# Altium footprint library ADRF6520.PcbLib: 4 footprints
Each footprint in its own frame and in the unit in brackets; x right, y up, seen from the top. Pads: shape width x height; smd on the part's side, far side on the other; paste and mask are expansions set on the pad; w line width, h text height; cw(c..) or ccw(c..) is an arc to the next point about the centre after c.
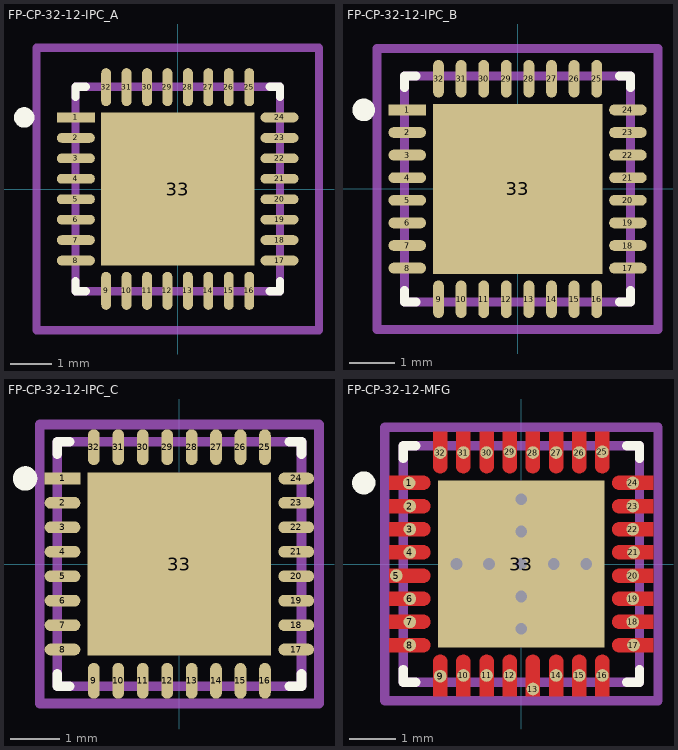
[diagram p0: the footprints below, top view; thin cyan lines are the x and y axes]

## FP-CP-32-12-IPC_A [mm]
pads (33):
  rect 0.931x0.239 smd paste+0 mask+0: 1(-2.491,1.75)
  rrect100% 0.931x0.239 smd paste+0 mask+0: 2(-2.491,1.25) 3(-2.491,0.75) 4(-2.491,0.25) 5(-2.491,-0.25) 6(-2.491,-0.75) 7(-2.491,-1.25) 8(-2.491,-1.75) 17(2.491,-1.75) 18(2.491,-1.25) 19(2.491,-0.75) 20(2.491,-0.25) 21(2.491,0.25) 22(2.491,0.75) 23(2.491,1.25) 24(2.491,1.75)
  rrect100% 0.239x0.931 smd paste+0 mask+0: 9(-1.75,-2.491) 10(-1.25,-2.491) 11(-0.75,-2.491) 12(-0.25,-2.491) 13(0.25,-2.491) 14(0.75,-2.491) 15(1.25,-2.491) 16(1.75,-2.491) 25(1.75,2.491) 26(1.25,2.491) 27(0.75,2.491) 28(0.25,2.491) 29(-0.25,2.491) 30(-0.75,2.491) 31(-1.25,2.491) 32(-1.75,2.491)
  rect 3.75x3.75 smd paste-1000 mask+0: 33(0,0)
Top Overlay:
  circle w0.25: c-3.756,1.75 r0.125
  lines w0.2: -2.5,-2.25 -2.5,-2.5 -2.25,-2.5 ; -2.5,2.25 -2.5,2.5 -2.25,2.5 ; 2.25,-2.5 2.5,-2.5 2.5,-2.25 ; 2.25,2.5 2.5,2.5 2.5,2.25
Top Paste:
  rectangle: -1.186,-1.186 1.186,1.186
Top Assembly:
  lines w0.2: -3.456,-3.456 3.456,-3.456 3.456,3.456 -3.456,3.456 -3.456,-3.456
  text ".Designator" at 0,0.188 h1
Top 3D Body:
  lines w0.2: -2.5,-2.5 2.5,-2.5 2.5,2.5 -2.5,2.5 -2.5,-2.5
Top Courtyard:
  lines w0.2: -3.456,-3.456 3.456,-3.456 3.456,3.456 -3.456,3.456 -3.456,-3.456
Top Component Center:
  lines w0.1: -0.5,0 0.5,0 ; 0,-0.5 0,0.5
3D body "IC_Analog_Devices_AD5423BCPZ-RL7_eec.STEP": height 0.25, standoff 0, extent -3.456,-3.456 3.456,3.456

## FP-CP-32-12-IPC_B [mm]
pads (33):
  rect 0.831x0.239 smd paste+0 mask+0: 1(-2.441,1.75)
  rrect100% 0.831x0.239 smd paste+0 mask+0: 2(-2.441,1.25) 3(-2.441,0.75) 4(-2.441,0.25) 5(-2.441,-0.25) 6(-2.441,-0.75) 7(-2.441,-1.25) 8(-2.441,-1.75) 17(2.441,-1.75) 18(2.441,-1.25) 19(2.441,-0.75) 20(2.441,-0.25) 21(2.441,0.25) 22(2.441,0.75) 23(2.441,1.25) 24(2.441,1.75)
  rrect100% 0.239x0.831 smd paste+0 mask+0: 9(-1.75,-2.441) 10(-1.25,-2.441) 11(-0.75,-2.441) 12(-0.25,-2.441) 13(0.25,-2.441) 14(0.75,-2.441) 15(1.25,-2.441) 16(1.75,-2.441) 25(1.75,2.441) 26(1.25,2.441) 27(0.75,2.441) 28(0.25,2.441) 29(-0.25,2.441) 30(-0.75,2.441) 31(-1.25,2.441) 32(-1.75,2.441)
  rect 3.75x3.75 smd paste-1000 mask+0: 33(0,0)
Top Overlay:
  circle w0.25: c-3.406,1.75 r0.125
  lines w0.2: -2.5,-2.25 -2.5,-2.5 -2.25,-2.5 ; -2.5,2.25 -2.5,2.5 -2.25,2.5 ; 2.25,-2.5 2.5,-2.5 2.5,-2.25 ; 2.25,2.5 2.5,2.5 2.5,2.25
Top Paste:
  rectangle: -1.186,-1.186 1.186,1.186
Top Assembly:
  lines w0.2: -3.106,-3.106 3.106,-3.106 3.106,3.106 -3.106,3.106 -3.106,-3.106
  text ".Designator" at 0,0.188 h1
Top 3D Body:
  lines w0.2: -2.5,-2.5 2.5,-2.5 2.5,2.5 -2.5,2.5 -2.5,-2.5
Top Courtyard:
  lines w0.2: -3.106,-3.106 3.106,-3.106 3.106,3.106 -3.106,3.106 -3.106,-3.106
Top Component Center:
  lines w0.1: -0.5,0 0.5,0 ; 0,-0.5 0,0.5
3D body "IC_Analog_Devices_AD5423BCPZ-RL7_eec.STEP": height 0.25, standoff 0, extent -3.106,-3.106 3.106,3.106

## FP-CP-32-12-IPC_C [mm]
pads (33):
  rect 0.731x0.239 smd paste+0 mask+0: 1(-2.391,1.75)
  rrect100% 0.731x0.239 smd paste+0 mask+0: 2(-2.391,1.25) 3(-2.391,0.75) 4(-2.391,0.25) 5(-2.391,-0.25) 6(-2.391,-0.75) 7(-2.391,-1.25) 8(-2.391,-1.75) 17(2.391,-1.75) 18(2.391,-1.25) 19(2.391,-0.75) 20(2.391,-0.25) 21(2.391,0.25) 22(2.391,0.75) 23(2.391,1.25) 24(2.391,1.75)
  rrect100% 0.239x0.731 smd paste+0 mask+0: 9(-1.75,-2.391) 10(-1.25,-2.391) 11(-0.75,-2.391) 12(-0.25,-2.391) 13(0.25,-2.391) 14(0.75,-2.391) 15(1.25,-2.391) 16(1.75,-2.391) 25(1.75,2.391) 26(1.25,2.391) 27(0.75,2.391) 28(0.25,2.391) 29(-0.25,2.391) 30(-0.75,2.391) 31(-1.25,2.391) 32(-1.75,2.391)
  rect 3.75x3.75 smd paste-1000 mask+0: 33(0,0)
Top Overlay:
  circle w0.25: c-3.156,1.75 r0.125
  lines w0.2: -2.5,-2.25 -2.5,-2.5 -2.25,-2.5 ; -2.5,2.25 -2.5,2.5 -2.25,2.5 ; 2.25,-2.5 2.5,-2.5 2.5,-2.25 ; 2.25,2.5 2.5,2.5 2.5,2.25
Top Paste:
  rectangle: -1.186,-1.186 1.186,1.186
Top Assembly:
  lines w0.2: -2.856,-2.856 2.856,-2.856 2.856,2.856 -2.856,2.856 -2.856,-2.856
  text ".Designator" at 0,0.188 h1
Top 3D Body:
  lines w0.2: -2.5,-2.5 2.5,-2.5 2.5,2.5 -2.5,2.5 -2.5,-2.5
Top Courtyard:
  lines w0.2: -2.856,-2.856 2.856,-2.856 2.856,2.856 -2.856,2.856 -2.856,-2.856
Top Component Center:
  lines w0.1: -0.5,0 0.5,0 ; 0,-0.5 0,0.5
3D body "IC_Analog_Devices_AD5423BCPZ-RL7_eec.STEP": height 0.25, standoff 0, extent -2.856,-2.856 2.856,2.856

## FP-CP-32-12-MFG [mm]
pads (33):
  round 0.274 smd paste+0 mask+0: 1(-2.421,1.75) 2(-2.405,1.25) 3(-2.405,0.75) 4(-2.405,0.25) 5(-2.698,-0.25) 6(-2.405,-0.75) 7(-2.405,-1.25) 8(-2.405,-1.75) 9(-1.75,-2.421) 10(-1.25,-2.405) 11(-0.75,-2.405) 12(-0.25,-2.405) 13(0.25,-2.698) 14(0.75,-2.405) 15(1.25,-2.405) 16(1.75,-2.405) 17(2.421,-1.75) 18(2.405,-1.25) 19(2.405,-0.75) 20(2.405,-0.25) 21(2.421,0.25) 22(2.405,0.75) 23(2.405,1.25) 24(2.405,1.75) 25(1.75,2.421) 26(1.25,2.405) 27(0.75,2.405) 28(0.25,2.405) 29(-0.25,2.421) 30(-0.75,2.405) 31(-1.25,2.405) 32(-1.75,2.405)
  rect 3.6x3.6 smd paste-1000 mask+0: 33(0,0)
via 0,1.4 diameter 0.533 hole 0.254
via 0,0.7 diameter 0.533 hole 0.254
via 0,-0.7 diameter 0.533 hole 0.254
via 0,-1.4 diameter 0.533 hole 0.254
via -1.4,0 diameter 0.533 hole 0.254
via -0.7,0 diameter 0.533 hole 0.254
via 0,0 diameter 0.533 hole 0.254
via 0.7,0 diameter 0.533 hole 0.254
via 1.4,0 diameter 0.533 hole 0.254
Top Layer:
  region: -2.85,1.902 -2.113,1.902 -2.083,1.902 -2.027,1.879 -1.984,1.836 -1.961,1.78 -1.961,1.75 -1.961,1.72 -1.984,1.664 -2.027,1.621 -2.083,1.598 -2.113,1.598 -2.85,1.598
  region: -2.85,1.402 -2.113,1.402 -2.083,1.402 -2.027,1.379 -1.984,1.336 -1.961,1.28 -1.961,1.25 -1.961,1.22 -1.984,1.164 -2.027,1.121 -2.083,1.098 -2.113,1.098 -2.85,1.098
  region: -2.85,0.902 -2.113,0.902 -2.083,0.902 -2.027,0.879 -1.984,0.836 -1.961,0.78 -1.961,0.75 -1.961,0.72 -1.984,0.664 -2.027,0.621 -2.083,0.598 -2.113,0.598 -2.85,0.598
  region: -2.85,0.402 -2.113,0.402 -2.083,0.402 -2.027,0.379 -1.984,0.336 -1.961,0.28 -1.961,0.25 -1.961,0.22 -1.984,0.164 -2.027,0.121 -2.083,0.098 -2.113,0.098 -2.85,0.098
  region: -2.85,-0.098 -2.113,-0.098 -2.083,-0.098 -2.027,-0.121 -1.984,-0.164 -1.961,-0.22 -1.961,-0.25 -1.961,-0.28 -1.984,-0.336 -2.027,-0.379 -2.083,-0.402 -2.113,-0.402 -2.85,-0.402
  region: -2.85,-0.598 -2.113,-0.598 -2.083,-0.598 -2.027,-0.621 -1.984,-0.664 -1.961,-0.72 -1.961,-0.75 -1.961,-0.78 -1.984,-0.836 -2.027,-0.879 -2.083,-0.902 -2.113,-0.902 -2.85,-0.902
  region: -2.85,-1.098 -2.113,-1.098 -2.083,-1.098 -2.027,-1.121 -1.984,-1.164 -1.961,-1.22 -1.961,-1.25 -1.961,-1.28 -1.984,-1.336 -2.027,-1.379 -2.083,-1.402 -2.113,-1.402 -2.85,-1.402
  region: -2.85,-1.598 -2.113,-1.598 -2.083,-1.598 -2.027,-1.621 -1.984,-1.664 -1.961,-1.72 -1.961,-1.75 -1.961,-1.78 -1.984,-1.836 -2.027,-1.879 -2.083,-1.902 -2.113,-1.902 -2.85,-1.902
  region: 2.85,-1.902 2.113,-1.902 2.083,-1.902 2.027,-1.879 1.984,-1.836 1.961,-1.78 1.961,-1.75 1.961,-1.72 1.984,-1.664 2.027,-1.621 2.083,-1.598 2.113,-1.598 2.85,-1.598
  region: 2.85,-1.402 2.113,-1.402 2.083,-1.402 2.027,-1.379 1.984,-1.336 1.961,-1.28 1.961,-1.25 1.961,-1.22 1.984,-1.164 2.027,-1.121 2.083,-1.098 2.113,-1.098 2.85,-1.098
  region: 2.85,-0.902 2.113,-0.902 2.083,-0.902 2.027,-0.879 1.984,-0.836 1.961,-0.78 1.961,-0.75 1.961,-0.72 1.984,-0.664 2.027,-0.621 2.083,-0.598 2.113,-0.598 2.85,-0.598
  region: 2.85,-0.402 2.113,-0.402 2.083,-0.402 2.027,-0.379 1.984,-0.336 1.961,-0.28 1.961,-0.25 1.961,-0.22 1.984,-0.164 2.027,-0.121 2.083,-0.098 2.113,-0.098 2.85,-0.098
  region: 2.85,0.098 2.113,0.098 2.083,0.098 2.027,0.121 1.984,0.164 1.961,0.22 1.961,0.25 1.961,0.28 1.984,0.336 2.027,0.379 2.083,0.402 2.113,0.402 2.85,0.402
  region: 2.85,0.598 2.113,0.598 2.083,0.598 2.027,0.621 1.984,0.664 1.961,0.72 1.961,0.75 1.961,0.78 1.984,0.836 2.027,0.879 2.083,0.902 2.113,0.902 2.85,0.902
  region: 2.85,1.098 2.113,1.098 2.083,1.098 2.027,1.121 1.984,1.164 1.961,1.22 1.961,1.25 1.961,1.28 1.984,1.336 2.027,1.379 2.083,1.402 2.113,1.402 2.85,1.402
  region: 2.85,1.598 2.113,1.598 2.083,1.598 2.027,1.621 1.984,1.664 1.961,1.72 1.961,1.75 1.961,1.78 1.984,1.836 2.027,1.879 2.083,1.902 2.113,1.902 2.85,1.902
  region: -1.902,-2.85 -1.902,-2.113 -1.902,-2.083 -1.879,-2.027 -1.836,-1.984 -1.78,-1.961 -1.75,-1.961 -1.72,-1.961 -1.664,-1.984 -1.621,-2.027 -1.598,-2.083 -1.598,-2.113 -1.598,-2.85
  region: -1.402,-2.85 -1.402,-2.113 -1.402,-2.083 -1.379,-2.027 -1.336,-1.984 -1.28,-1.961 -1.25,-1.961 -1.22,-1.961 -1.164,-1.984 -1.121,-2.027 -1.098,-2.083 -1.098,-2.113 -1.098,-2.85
  region: -0.902,-2.85 -0.902,-2.113 -0.902,-2.083 -0.879,-2.027 -0.836,-1.984 -0.78,-1.961 -0.75,-1.961 -0.72,-1.961 -0.664,-1.984 -0.621,-2.027 -0.598,-2.083 -0.598,-2.113 -0.598,-2.85
  region: -0.402,-2.85 -0.402,-2.113 -0.402,-2.083 -0.379,-2.027 -0.336,-1.984 -0.28,-1.961 -0.25,-1.961 -0.22,-1.961 -0.164,-1.984 -0.121,-2.027 -0.098,-2.083 -0.098,-2.113 -0.098,-2.85
  region: 0.098,-2.85 0.098,-2.113 0.098,-2.083 0.121,-2.027 0.164,-1.984 0.22,-1.961 0.25,-1.961 0.28,-1.961 0.336,-1.984 0.379,-2.027 0.402,-2.083 0.402,-2.113 0.402,-2.85
  region: 0.598,-2.85 0.598,-2.113 0.598,-2.083 0.621,-2.027 0.664,-1.984 0.72,-1.961 0.75,-1.961 0.78,-1.961 0.836,-1.984 0.879,-2.027 0.902,-2.083 0.902,-2.113 0.902,-2.85
  region: 1.098,-2.85 1.098,-2.113 1.098,-2.083 1.121,-2.027 1.164,-1.984 1.22,-1.961 1.25,-1.961 1.28,-1.961 1.336,-1.984 1.379,-2.027 1.402,-2.083 1.402,-2.113 1.402,-2.85
  region: 1.598,-2.85 1.598,-2.113 1.598,-2.083 1.621,-2.027 1.664,-1.984 1.72,-1.961 1.75,-1.961 1.78,-1.961 1.836,-1.984 1.879,-2.027 1.902,-2.083 1.902,-2.113 1.902,-2.85
  region: 1.902,2.85 1.902,2.113 1.902,2.083 1.879,2.027 1.836,1.984 1.78,1.961 1.75,1.961 1.72,1.961 1.664,1.984 1.621,2.027 1.598,2.083 1.598,2.113 1.598,2.85
  region: 1.402,2.85 1.402,2.113 1.402,2.083 1.379,2.027 1.336,1.984 1.28,1.961 1.25,1.961 1.22,1.961 1.164,1.984 1.121,2.027 1.098,2.083 1.098,2.113 1.098,2.85
  region: 0.902,2.85 0.902,2.113 0.902,2.083 0.879,2.027 0.836,1.984 0.78,1.961 0.75,1.961 0.72,1.961 0.664,1.984 0.621,2.027 0.598,2.083 0.598,2.113 0.598,2.85
  region: 0.402,2.85 0.402,2.113 0.402,2.083 0.379,2.027 0.336,1.984 0.28,1.961 0.25,1.961 0.22,1.961 0.164,1.984 0.121,2.027 0.098,2.083 0.098,2.113 0.098,2.85
  region: -0.098,2.85 -0.098,2.113 -0.098,2.083 -0.121,2.027 -0.164,1.984 -0.22,1.961 -0.25,1.961 -0.28,1.961 -0.336,1.984 -0.379,2.027 -0.402,2.083 -0.402,2.113 -0.402,2.85
  region: -0.598,2.85 -0.598,2.113 -0.598,2.083 -0.621,2.027 -0.664,1.984 -0.72,1.961 -0.75,1.961 -0.78,1.961 -0.836,1.984 -0.879,2.027 -0.902,2.083 -0.902,2.113 -0.902,2.85
  region: -1.098,2.85 -1.098,2.113 -1.098,2.083 -1.121,2.027 -1.164,1.984 -1.22,1.961 -1.25,1.961 -1.28,1.961 -1.336,1.984 -1.379,2.027 -1.402,2.083 -1.402,2.113 -1.402,2.85
  region: -1.598,2.85 -1.598,2.113 -1.598,2.083 -1.621,2.027 -1.664,1.984 -1.72,1.961 -1.75,1.961 -1.78,1.961 -1.836,1.984 -1.879,2.027 -1.902,2.083 -1.902,2.113 -1.902,2.85
Top Overlay:
  circle w0.25: c-3.4,1.75 r0.125
  lines w0.2: -2.55,-2.277 -2.55,-2.55 -2.277,-2.55 ; -2.55,2.277 -2.55,2.55 -2.277,2.55 ; 2.277,-2.55 2.55,-2.55 2.55,-2.277 ; 2.277,2.55 2.55,2.55 2.55,2.277
Top Paste:
  rectangle: -1.7,0.2 -0.2,1.7
  rectangle: 0.2,0.2 1.7,1.7
  rectangle: -1.7,-1.7 -0.2,-0.2
  rectangle: 0.2,-1.7 1.7,-0.2
Top Assembly:
  lines w0.2: -2.95,-2.95 2.95,-2.95 2.95,2.95 -2.95,2.95 -2.95,-2.95
  text ".Designator" at 0,-0.001 h1
Top 3D Body:
  lines w0.2: -2.55,-2.55 2.55,-2.55 2.55,2.55 -2.55,2.55 -2.55,-2.55
Top Courtyard:
  lines w0.2: -2.95,-2.95 2.95,-2.95 2.95,2.95 -2.95,2.95 -2.95,-2.95
Top Component Center:
  lines w0.1: -0.5,0 0.5,0 ; 0,-0.5 0,0.5
3D body "IC_Analog_Devices_AD5423BCPZ-RL7_eec.STEP": height 0.25, standoff 0, extent -2.95,-2.95 2.95,2.95